# Altium footprint library FootPrintLib_11.PcbLib: 376 footprints (part 12 of 24)
Each footprint in its own frame and in the unit in brackets; x right, y up, seen from the top. Pads: shape width x height; smd on the part's side, far side on the other; paste and mask are expansions set on the pad; w line width, h text height; cw(c..) or ccw(c..) is an arc to the next point about the centre after c.
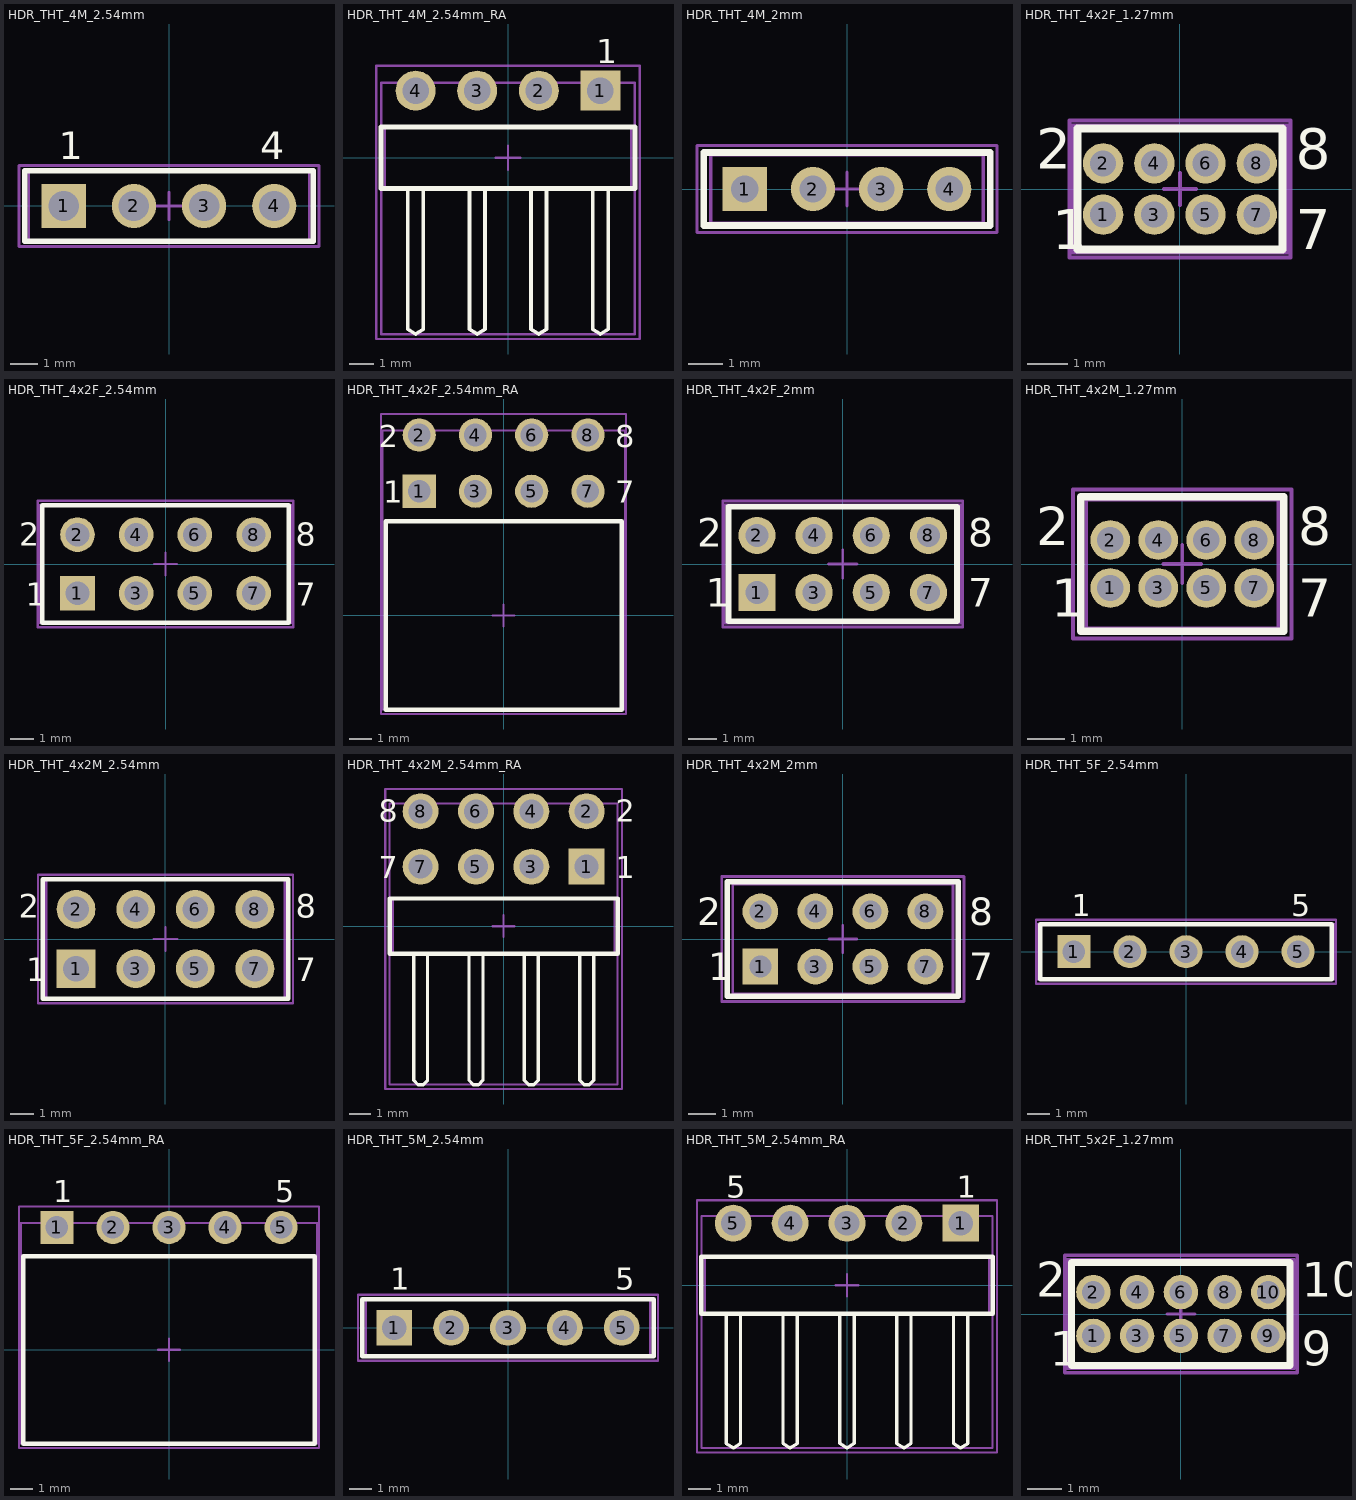
[diagram p11: the footprints below, top view; thin cyan lines are the x and y axes]

## HDR_THT_4M_2.54mm [mm] "Pin Header, pitch 2.54 mm, THT, Vertical, single row, 4p"
height 8.54
pads (4):
  rect 1.6x1.6 hole 1.1: 1(-3.81,0)
  round 1.6 hole 1.1: 2(-1.27,0) 3(1.27,0) 4(3.81,0)
Top Overlay:
  lines w0.2: -5.23,-1.27 5.23,-1.27 5.23,1.27 -5.23,1.27 -5.23,-1.27
  text "4" at 3.3,1.7 h1
  text "1" at -4,1.7 h1
Mechanical 11:
  lines w0.1: -5.08,-1.27 -5.08,1.27 5.08,1.27 5.08,-1.27 -5.08,-1.27
Mechanical 13:
  lines w0.1: -5.23,-1.27 5.23,-1.27 5.23,1.27 -5.23,1.27 -5.23,-1.27
Mechanical 15:
  lines w0.1: -0.5,0 0.5,0 ; 0,-0.5 0,0.5 ; -5.43,-1.47 5.43,-1.47 5.43,1.47 -5.43,1.47 -5.43,-1.47
3D body "61300411121.stp": height 8.57, standoff -2.97, extent -5.08,-1.27 5.08,1.27

## HDR_THT_4M_2.54mm_RA [mm] "Pin Header, pitch 2.54 mm, THT, Angled, single row, 4p"
height 2.54
pads (4):
  rect 1.65x1.65 hole 1.1: 1(3.81,2.77)
  round 1.65 hole 1.1: 2(1.27,2.77) 3(-1.27,2.77) 4(-3.81,2.77)
Top Overlay:
  lines w0.15: -4.13,-1.27 -4.13,-7.07 -3.81,-7.27 -3.49,-7.07 -3.49,-1.27 ; -1.59,-1.27 -1.59,-7.07 -1.27,-7.27 -0.95,-7.07 -0.95,-1.27 ; 0.95,-1.27 0.95,-7.07 1.27,-7.27 1.59,-7.07 1.59,-1.27 ; 3.49,-1.27 3.49,-7.07 3.81,-7.27 4.13,-7.07 4.13,-1.27
  lines w0.2: -5.23,-1.27 -5.23,1.27 5.23,1.27 5.23,-1.27 -5.23,-1.27
  text "1" at 3.64,3.9 h1
Mechanical 11:
  lines w0.1: -5.08,-1.27 -5.08,1.27 5.08,1.27 5.08,-1.27 -5.08,-1.27
Mechanical 13:
  lines w0.1: -5.23,-7.27 -5.23,3.09 5.23,3.09 5.23,-7.27 -5.23,-7.27
Mechanical 15:
  lines w0.1: -0.5,0 0.5,0 ; 0,-0.5 0,0.5 ; -5.43,-7.47 5.43,-7.47 5.43,3.795 -5.43,3.795 -5.43,-7.47
3D body "61300411021.stp": height 2.62, standoff -2.92, extent -5.08,-7.27 5.08,3.09

## HDR_THT_4M_2mm [mm] "Pin Header, pitch 2.00 mm, THT, Vertical, single row, 4p"
height 6.35
pads (4):
  rect 1.3x1.3 hole 0.8: 1(-3,0)
  round 1.3 hole 0.8: 2(-1,0) 3(1,0) 4(3,0)
Top Overlay:
  lines w0.2: -4.2,-1.075 -4.2,1.075 4.2,1.075 4.2,-1.075 -4.2,-1.075
Mechanical 11:
  lines w0.1: -4,-1 -4,1 4,1 4,-1 -4,-1
Mechanical 13:
  lines w0.1: -4.2,-1.075 -4.2,1.075 4.2,1.075 4.2,-1.075 -4.2,-1.075
Mechanical 15:
  lines w0.1: -0.5,0 0.5,0 ; 0,-0.5 0,0.5 ; -4.4,-1.275 -4.4,1.275 4.4,1.275 4.4,-1.275 -4.4,-1.275
3D body "62000411121.stp": height 6.05, standoff -2.65, extent -4,-1 4,1

## HDR_THT_4x2F_1.27mm [mm] "Socket Header, Pitch 1.27 mm, THT, Vertical, dual row, 8p"
height 4.65
pads (8):
  round 1 hole 0.65: 1(-1.905,-0.635) 2(-1.905,0.635) 3(-0.635,-0.635) 4(-0.635,0.635) 5(0.635,-0.635) 6(0.635,0.635) 7(1.905,-0.635) 8(1.905,0.635)
Top Overlay:
  lines w0.2: -2.54,-1.5 2.54,-1.5 2.54,1.5 -2.54,1.5 -2.54,-1.5
  text "2" at -3.57,0.5 h1
  text "1" at -3.17,-1.5 h1
  text "8" at 2.87,0.5 h1
  text "7" at 2.87,-1.5 h1
Mechanical 11:
  lines w0.1: -2.54,-1.5 2.54,-1.5 2.54,1.5 -2.54,1.5 -2.54,-1.5
Mechanical 13:
  lines w0.1: -2.665,-1.575 -2.665,1.575 2.665,1.575 2.665,-1.575 -2.665,-1.575
Mechanical 15:
  lines w0.1: -0.4,0 0.4,0 ; 0,-0.4 0,0.4 ; -2.74,-1.7 2.74,-1.7 2.74,1.7 -2.74,1.7 -2.74,-1.7
3D body "62200821821.stp": height 4.55, standoff -2.15, extent -2.74,-1.5 2.74,1.5

## HDR_THT_4x2F_2.54mm [mm] "Socket Header, Pitch 2.54 mm, THT, Vertical, dual row, 8p"
height 8.4
pads (8):
  rect 1.5x1.5 hole 1.02: 1(-3.81,-1.27)
  round 1.5 hole 1.02: 2(-3.81,1.27) 3(-1.27,-1.27) 4(-1.27,1.27) 5(1.27,-1.27) 6(1.27,1.27) 7(3.81,-1.27) 8(3.81,1.27)
Top Overlay:
  lines w0.2: -5.33,-2.54 -5.33,2.54 5.33,2.54 5.33,-2.54 -5.33,-2.54
  text "2" at -6.34,0.8 h1
  text "1" at -6.04,-1.8 h1
  text "7" at 5.64,-1.8 h1
  text "8" at 5.64,0.8 h1
Mechanical 11:
  lines w0.1: -5.33,-2.54 5.33,-2.54 5.33,2.54 -5.33,2.54 -5.33,-2.54
Mechanical 13:
  lines w0.1: -5.455,-2.54 -5.455,2.54 5.455,2.54 5.455,-2.54 -5.455,-2.54
Mechanical 15:
  lines w0.1: -0.5,0 0.5,0 ; 0,-0.5 0,0.5 ; -5.53,-2.74 -5.53,2.74 5.53,2.74 5.53,-2.74 -5.53,-2.74
3D body "61300821821.stp": height 8.45, standoff -3.05, extent -5.33,-2.54 5.33,2.54

## HDR_THT_4x2F_2.54mm_RA [mm] "Socket Header, Pitch 2.54 mm, THT, Angled, dual row, 8p"
height 5.08
pads (8):
  rect 1.5x1.5 hole 1.02: 1(-3.81,5.61)
  round 1.5 hole 1.02: 2(-3.81,8.15) 3(-1.27,5.61) 4(-1.27,8.15) 5(1.27,5.61) 6(1.27,8.15) 7(3.81,5.61) 8(3.81,8.15)
Top Overlay:
  lines w0.2: -5.33,-4.25 -5.33,4.25 5.33,4.25 5.33,-4.25 -5.33,-4.25
  text "2" at -5.64,7.6 h1
  text "1" at -5.44,5.1 h1
  text "8" at 5.04,7.6 h1
  text "7" at 5.04,5.1 h1
Mechanical 11:
  lines w0.1: -5.33,-4.25 5.33,-4.25 5.33,4.25 -5.33,4.25 -5.33,-4.25
Mechanical 13:
  lines w0.1: -5.48,-4.25 5.48,-4.25 5.48,8.35 -5.48,8.35 -5.48,-4.25
Mechanical 15:
  lines w0.1: -0.5,0 0.5,0 ; 0,-0.5 0,0.5 ; -5.53,-4.45 5.53,-4.45 5.53,9.1 -5.53,9.1 -5.53,-4.45
3D body "613008243121.stp": height 5.05, standoff -3.25, extent -5.33,-4.25 5.33,8.35

## HDR_THT_4x2F_2mm [mm] "Socket Header, Pitch 2.00 mm, THT, Vertical, dual row, 8p"
height 4.45
pads (8):
  rect 1.3x1.3 hole 0.8: 1(-3,-1)
  round 1.3 hole 0.8: 2(-3,1) 3(-1,-1) 4(-1,1) 5(1,-1) 6(1,1) 7(3,-1) 8(3,1)
Top Overlay:
  lines w0.2: -4,-2 -4,2 4,2 4,-2 -4,-2
  text "7" at 4.4,-1.5 h1
  text "8" at 4.4,0.6 h1
  text "1" at -4.8,-1.5 h1
  text "2" at -5.1,0.6 h1
Mechanical 11:
  lines w0.1: -4,-2 -4,2 4,2 4,-2 -4,-2
Mechanical 13:
  lines w0.1: -4.15,-2.075 -4.15,2.075 4.15,2.075 4.15,-2.075 -4.15,-2.075
Mechanical 15:
  lines w0.1: -0.5,0 0.5,0 ; 0,-0.5 0,0.5 ; -4.2,-2.2 -4.2,2.2 4.2,2.2 4.2,-2.2 -4.2,-2.2
3D body "62000821821.stp": height 4.35, standoff -2.35, extent -4.25,-2 4.25,2

## HDR_THT_4x2M_1.27mm [mm] "Pin Header, pitch 1.27 mm, THT, Vertical, dual row, 8p"
height 5.65
pads (8):
  round 1.05 hole 0.7: 1(-1.905,-0.635) 2(-1.905,0.635) 3(-0.635,-0.635) 4(-0.635,0.635) 5(0.635,-0.635) 6(0.635,0.635) 7(1.905,-0.635) 8(1.905,0.635)
Top Overlay:
  lines w0.2: -2.69,-1.775 2.69,-1.775 2.69,1.775 -2.69,1.775 -2.69,-1.775
  text "8" at 3.07,0.5 h1
  text "7" at 3.07,-1.4 h1
  text "2" at -3.87,0.5 h1
  text "1" at -3.47,-1.4 h1
Mechanical 11:
  lines w0.1: -2.54,-1.7 2.54,-1.7 2.54,1.7 -2.54,1.7 -2.54,-1.7
Mechanical 13:
  lines w0.1: -2.69,-1.775 2.69,-1.775 2.69,1.775 -2.69,1.775 -2.69,-1.775
Mechanical 15:
  lines w0.1: -0.5,0 0.5,0 ; 0,-0.5 0,0.5 ; -2.89,-1.975 -2.89,1.975 2.89,1.975 2.89,-1.975 -2.89,-1.975
3D body "62200821121.stp": height 5.33, standoff -2.27, extent -2.54,-1.7 2.54,1.7

## HDR_THT_4x2M_2.54mm [mm] "Pin Header, pitch 2.54 mm, THT, Vertical, dual row, 8p"
height 8.54
pads (8):
  rect 1.65x1.65 hole 1.1: 1(-3.81,-1.27)
  round 1.65 hole 1.1: 2(-3.81,1.27) 3(-1.27,-1.27) 4(-1.27,1.27) 5(1.27,-1.27) 6(1.27,1.27) 7(3.81,-1.27) 8(3.81,1.27)
Top Overlay:
  lines w0.2: -5.23,-2.54 5.23,-2.54 5.23,2.54 -5.23,2.54 -5.23,-2.54
  text "1" at -5.94,-1.8 h1
  text "2" at -6.24,0.9 h1
  text "7" at 5.54,-1.8 h1
  text "8" at 5.54,0.9 h1
Mechanical 11:
  lines w0.1: -5.08,-2.54 5.08,-2.54 5.08,2.54 -5.08,2.54 -5.08,-2.54
Mechanical 13:
  lines w0.1: -5.23,-2.54 5.23,-2.54 5.23,2.54 -5.23,2.54 -5.23,-2.54
Mechanical 15:
  lines w0.1: -0.5,0 0.5,0 ; 0,-0.5 0,0.5 ; -5.43,-2.74 5.43,-2.74 5.43,2.74 -5.43,2.74 -5.43,-2.74
3D body "61300821121.stp": height 8.59, standoff -2.95, extent -5.08,-2.54 5.08,2.54

## HDR_THT_4x2M_2.54mm_RA [mm] "Pin Header, pitch 2.54 mm, THT, Angled, dual row, 8p"
height 5.08
pads (8):
  rect 1.65x1.65 hole 1.1: 1(3.81,2.73)
  round 1.65 hole 1.1: 2(3.81,5.27) 3(1.27,2.73) 4(1.27,5.27) 5(-1.27,2.73) 6(-1.27,5.27) 7(-3.81,2.73) 8(-3.81,5.27)
Top Overlay:
  lines w0.15: -4.13,-1.335 -4.13,-7.07 -3.93,-7.27 -3.69,-7.27 -3.49,-7.07 -3.49,-1.31 ; -1.59,-1.335 -1.59,-7.07 -1.39,-7.27 -1.15,-7.27 -0.95,-7.07 -0.95,-1.31 ; 0.95,-1.335 0.95,-7.07 1.15,-7.27 1.39,-7.27 1.59,-7.07 1.59,-1.31 ; 3.49,-1.335 3.49,-7.07 3.69,-7.27 3.93,-7.27 4.13,-7.07 4.13,-1.31
  lines w0.2: -5.23,-1.27 -5.23,1.27 5.23,1.27 5.23,-1.27 -5.23,-1.27
  text "1" at 5.14,2.2 h1
  text "2" at 5.14,4.8 h1
  text "8" at -5.74,4.8 h1
  text "7" at -5.74,2.2 h1
Mechanical 11:
  lines w0.1: -5.08,-1.27 -5.08,1.27 5.08,1.27 5.08,-1.27 -5.08,-1.27
Mechanical 13:
  lines w0.1: -5.23,-7.27 5.23,-7.27 5.23,5.63 -5.23,5.63 -5.23,-7.27
Mechanical 15:
  lines w0.1: -0.5,0 0.5,0 ; 0,-0.5 0,0.5 ; -5.43,-7.47 5.43,-7.47 5.43,6.295 -5.43,6.295 -5.43,-7.47
3D body "61300821021.stp": height 5.14, standoff -2.94, extent -5.08,-7.27 5.08,5.63

## HDR_THT_4x2M_2mm [mm] "Pin Header, pitch 2.00 mm, THT, Vertical, dual row, 8p"
height 6
pads (8):
  rect 1.3x1.3 hole 0.8: 1(-3,-1)
  round 1.3 hole 0.8: 2(-3,1) 3(-1,-1) 4(-1,1) 5(1,-1) 6(1,1) 7(3,-1) 8(3,1)
Top Overlay:
  lines w0.2: -4.2,-2.075 4.2,-2.075 4.2,2.075 -4.2,2.075 -4.2,-2.075
  text "2" at -5.3,0.5 h1
  text "1" at -4.9,-1.5 h1
  text "7" at 4.6,-1.5 h1
  text "8" at 4.6,0.5 h1
Mechanical 11:
  lines w0.1: -4,-2 4,-2 4,2 -4,2 -4,-2
Mechanical 13:
  lines w0.1: -4.2,-2.075 4.2,-2.075 4.2,2.075 -4.2,2.075 -4.2,-2.075
Mechanical 15:
  lines w0.1: -0.5,0 0.5,0 ; 0,-0.5 0,0.5 ; -4.4,-2.275 4.4,-2.275 4.4,2.275 -4.4,2.275 -4.4,-2.275
3D body "62000821121.stp": height 6.05, standoff -2.65, extent -4,-2 4,2

## HDR_THT_5F_2.54mm [mm] "Socket Header, Pitch 2.54 mm, THT, Vertical, single row, 5p"
height 8.5
pads (5):
  rect 1.5x1.5 hole 1.02: 1(-5.08,0)
  round 1.5 hole 1.02: 2(-2.54,0) 3(0,0) 4(2.54,0) 5(5.08,0)
Top Overlay:
  lines w0.2: -6.6,-1.25 6.6,-1.25 6.6,1.25 -6.6,1.25 -6.6,-1.25
  text "1" at -5.17,1.6 h1
  text "5" at 4.77,1.6 h1
Mechanical 11:
  lines w0.1: -6.6,-1.25 6.6,-1.25 6.6,1.25 -6.6,1.25 -6.6,-1.25
Mechanical 13:
  lines w0.1: -6.725,-1.25 -6.725,1.25 6.725,1.25 6.725,-1.25 -6.725,-1.25
Mechanical 15:
  lines w0.1: -0.5,0 0.5,0 ; 0,-0.5 0,0.5 ; -6.8,-1.45 -6.8,1.45 6.8,1.45 6.8,-1.45 -6.8,-1.45
3D body "61300511821.stp": height 8.55, standoff -3.06, extent -6.6,-1.25 6.6,1.25

## HDR_THT_5F_2.54mm_RA [mm] "Socket Header, Pitch 2.54 mm, THT, Angled, single row, 5p"
height 2.5
pads (5):
  rect 1.5x1.5 hole 1.02: 1(-5.08,5.55)
  round 1.5 hole 1.02: 2(-2.54,5.55) 3(0,5.55) 4(2.54,5.55) 5(5.08,5.55)
Top Overlay:
  lines w0.2: -6.6,-4.25 -6.6,4.25 6.6,4.25 6.6,-4.25 -6.6,-4.25
  text "1" at -5.24,6.7 h1
  text "5" at 4.82,6.7 h1
Mechanical 11:
  lines w0.1: -6.6,-4.25 6.6,-4.25 6.6,4.25 -6.6,4.25 -6.6,-4.25
Mechanical 13:
  lines w0.1: -6.725,-4.25 -6.725,5.75 6.725,5.75 6.725,-4.25 -6.725,-4.25
Mechanical 15:
  lines w0.1: -0.5,0 0.5,0 ; 0,-0.5 0,0.5 ; -6.8,-4.45 -6.8,6.5 6.8,6.5 6.8,-4.45 -6.8,-4.45
3D body "613005143121.stp": height 2.55, standoff -3.04, extent -6.6,-4.25 6.6,5.75

## HDR_THT_5M_2.54mm [mm] "Pin Header, pitch 2.54 mm, THT, Vertical, single row, 5p"
height 8.54
pads (5):
  rect 1.6x1.6 hole 1.1: 1(-5.08,0)
  round 1.6 hole 1.1: 2(-2.54,0) 3(0,0) 4(2.54,0) 5(5.08,0)
Top Overlay:
  lines w0.2: -6.5,-1.27 -6.5,1.27 6.5,1.27 6.5,-1.27 -6.5,-1.27
  text "5" at 4.8,1.7 h1
  text "1" at -5.27,1.7 h1
Mechanical 11:
  lines w0.1: -6.35,-1.27 6.35,-1.27 6.35,1.27 -6.35,1.27 -6.35,-1.27
Mechanical 13:
  lines w0.1: -6.5,-1.27 -6.5,1.27 6.5,1.27 6.5,-1.27 -6.5,-1.27
Mechanical 15:
  lines w0.1: -0.5,0 0.5,0 ; 0,-0.5 0,0.5 ; -6.7,-1.47 -6.7,1.47 6.7,1.47 6.7,-1.47 -6.7,-1.47
3D body "61300511121.stp": height 8.57, standoff -2.97, extent -6.35,-1.27 6.35,1.27

## HDR_THT_5M_2.54mm_RA [mm] "Pin Header, pitch 2.54 mm, THT, Angled, single row, 5p"
height 2.54
pads (5):
  rect 1.65x1.65 hole 1.1: 1(5.08,2.77)
  round 1.65 hole 1.1: 2(2.54,2.77) 3(0,2.77) 4(-2.54,2.77) 5(-5.08,2.77)
Top Overlay:
  lines w0.15: -5.4,-1.27 -5.4,-7.07 -5.08,-7.27 -4.76,-7.07 -4.76,-1.27 ; -2.86,-1.27 -2.86,-7.07 -2.54,-7.27 -2.22,-7.07 -2.22,-1.27 ; -0.32,-1.27 -0.32,-7.07 0,-7.27 0.32,-7.07 0.32,-1.27 ; 2.22,-1.27 2.22,-7.07 2.54,-7.27 2.86,-7.07 2.86,-1.27 ; 4.76,-1.27 4.76,-7.07 5.08,-7.27 5.4,-7.07 5.4,-1.27
  lines w0.2: -6.5,-1.27 6.5,-1.27 6.5,1.27 -6.5,1.27 -6.5,-1.27
  text "5" at -5.4,3.9 h1
  text "1" at 4.91,3.9 h1
Mechanical 11:
  lines w0.1: -6.35,-1.27 6.35,-1.27 6.35,1.27 -6.35,1.27 -6.35,-1.27
Mechanical 13:
  lines w0.1: -6.5,-7.27 -6.5,3.09 6.5,3.09 6.5,-7.27 -6.5,-7.27
Mechanical 15:
  lines w0.1: -0.5,0 0.5,0 ; 0,-0.5 0,0.5 ; -6.7,-7.47 -6.7,3.795 6.7,3.795 6.7,-7.47 -6.7,-7.47
3D body "61300511021.stp": height 2.62, standoff -2.92, extent -6.35,-7.27 6.35,3.09

## HDR_THT_5x2F_1.27mm [mm] "Socket Header, Pitch 1.27 mm, THT, Vertical, dual row, 10p"
height 4.65
pads (10):
  round 1 hole 0.65: 1(-2.54,-0.635) 2(-2.54,0.635) 3(-1.27,-0.635) 4(-1.27,0.635) 5(0,-0.635) 6(0,0.635) 7(1.27,-0.635) 8(1.27,0.635) 9(2.54,-0.635) 10(2.54,0.635)
Top Overlay:
  lines w0.2: -3.175,-1.5 -3.175,1.5 3.175,1.5 3.175,-1.5 -3.175,-1.5
  text "1" at -3.805,-1.5 h1
  text "2" at -4.205,0.5 h1
  text "9" at 3.505,-1.5 h1
  text "10" at 3.505,0.5 h1
Mechanical 11:
  lines w0.1: -3.175,-1.5 -3.175,1.5 3.175,1.5 3.175,-1.5 -3.175,-1.5
Mechanical 13:
  lines w0.1: -3.3,-1.575 3.3,-1.575 3.3,1.575 -3.3,1.575 -3.3,-1.575
Mechanical 15:
  lines w0.1: -0.4,0 0.4,0 ; 0,-0.4 0,0.4 ; -3.375,-1.7 -3.375,1.7 3.375,1.7 3.375,-1.7 -3.375,-1.7
3D body "62201021821.stp": height 4.55, standoff -2.15, extent -3.375,-1.5 3.375,1.5